# Altium schematic symbol library 5.0SMDJ60A.SchLib.SchLib: 2 symbols
Pins are listed as number, name and electrical type; pins without a type are passive.

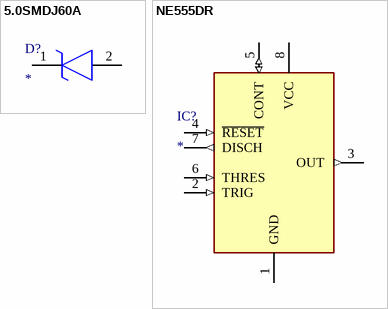
[diagram p0: symbols 5.0SMDJ60A to NE555DR]

## 5.0SMDJ60A
designator D?
TVS Diode (Uni-directional); Manufacturer_Name: LITTELFUSE; Manufacturer_Part_Number: 5.0SMDJ60A; Description: 96.8V Clamp 51.7A Ipp Tvs Diode Surface Mount DO-214AB (SMCJ); Datasheet Link: https://www.littelfuse.com/media?resourcetype=datasheets&itemid=2b2f4a8c-2e81-4894-8d41-3d748bb79e68&filename=littelfuse-tvs-diode-5-0smdj-datasheet; Height: 2.62mm; Mouser Part Number: 576-5.0SMDJ60A; Mouser Price/Stock: https://www.mouser.co.uk/ProductDetail/Littelfuse/5.0SMDJ60A?qs=ZSIFh4sPSRrxBM5elXyXAQ%3D%3D; Arrow Part Number: 5.0SMDJ60A; Arrow Price/Stock: https://www.arrow.com/en/products/5-0smdj60a/littelfuse.html?utm_currency=USD&region=asia
footprint DIOM7959X262N
pins: 1 K, 2 A

## NE555DR
designator IC?
Integrated Circuit; Manufacturer_Name: Texas Instruments; Manufacturer_Part_Number: NE555DR; Datasheet Link: http://www.ti.com/lit/ds/symlink/ne555.pdf; Height: 1.75mm; Mouser Part Number: 595-NE555DR; Mouser Price/Stock: https://www.mouser.com/Search/Refine.aspx?Keyword=595-NE555DR; RS Part Number: 1218414; RS Price/Stock: http://uk.rs-online.com/web/p/products/1218414
footprint SOIC127P600X175-8N
pins: 1 GND (power), 2 TRIG (in), 3 OUT (out), 4 ~{RESET} (in), 5 CONT (io), 6 THRES (in), 7 DISCH (out), 8 VCC (power)